# Altium schematic symbol library XL1509-3.3E1.SchLib: 1 symbol
Pins are listed as number, name and electrical type; pins without a type are passive.

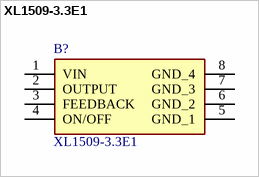
[diagram p0: symbol XL1509-3.3E1]

## XL1509-3.3E1
designator B?
40V 2A SOP-8_150mil DC-DC Converters RoHS; Manufacturer_Name: XLSEMI; Geometry.Height: 1.75mm; Manufacturer_Part_Number: XL1509-3.3E1; Mouser Part Number: *; Mouser Price/Stock: *; Arrow Part Number: *; Arrow Price/Stock: *; Datasheet Link: https://datasheet.lcsc.com/szlcsc/XLSEMI-XL1509-3-3E1_C74193.pdf
footprint SOIC127P600X175-8N
pins: 1 VIN, 2 OUTPUT, 3 FEEDBACK, 4 ON/OFF, 5 GND_1, 6 GND_2, 7 GND_3, 8 GND_4